# Altium footprint library LGA-12_L2.0-W2.0-P0.50-BL.PcbLib: 1 footprints
Each footprint in its own frame and in the unit in brackets; x right, y up, seen from the top. Pads: shape width x height; smd on the part's side, far side on the other; paste and mask are expansions set on the pad; w line width, h text height; cw(c..) or ccw(c..) is an arc to the next point about the centre after c.
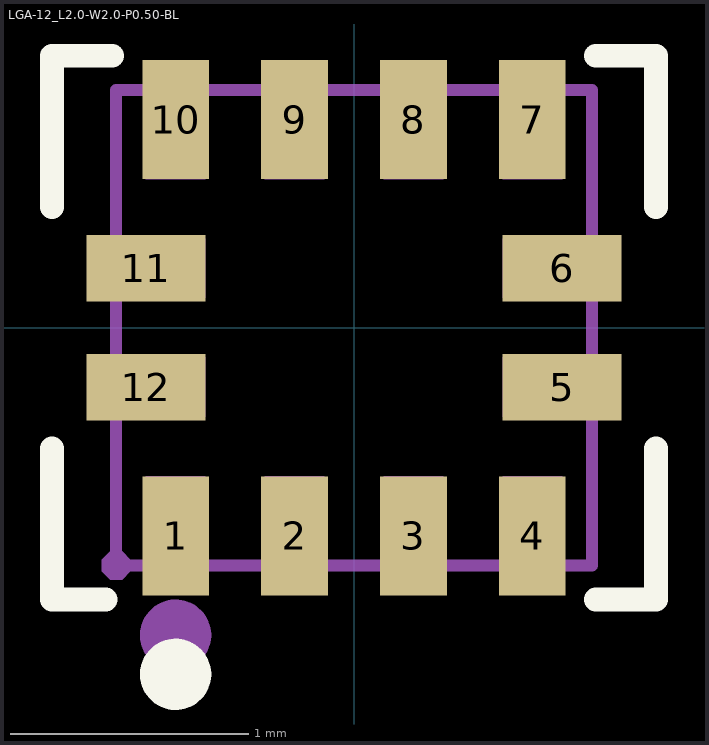
[diagram p0: the footprint, top view; thin cyan lines are the x and y axes]

## LGA-12_L2.0-W2.0-P0.50-BL [mm]
pads (12):
  rect 0.28x0.5 smd paste+0.051: 1(-0.75,-0.875) 2(-0.25,-0.875) 3(0.25,-0.875) 4(0.75,-0.875) 7(0.75,0.875) 8(0.25,0.875) 9(-0.25,0.875) 10(-0.75,0.875)
  rect 0.5x0.28 smd paste+0.051: 5(0.875,-0.25) 6(0.875,0.25) 11(-0.875,0.25) 12(-0.875,-0.25)
Top Overlay:
  circle w0.15: c-0.75,-1.457 r0.075
  lines w0.1: -1.27,-0.508 -1.27,-1.143 -1.044,-1.143 ; -1.27,0.508 -1.27,1.143 -1.016,1.143 ; 1.016,-1.143 1.27,-1.143 1.27,-0.508 ; 1.016,1.143 1.27,1.143 1.27,0.508
Mechanical 2:
  circle w0.15: c-0.75,-1.293 r0.075
Mechanical 6:
  lines w0.051: -1,-1 -1,1 1,1 1,-1 -1,-1
Mechanical 8:
  region: -0.94,-1 -0.94,-1.025 -0.975,-1.06 -1.025,-1.06 -1.06,-1.025 -1.06,-1 -1.06,-0.975 -1.025,-0.94 -0.975,-0.94 -0.94,-0.975 -0.94,-1
Mechanical 9:
  region: -0.875,-0.625 -0.625,-0.625 -0.625,-0.9 -0.875,-0.9
  region: -0.375,-0.625 -0.125,-0.625 -0.125,-0.9 -0.375,-0.9
  region: 0.125,-0.625 0.375,-0.625 0.375,-0.9 0.125,-0.9
  region: 0.625,-0.625 0.875,-0.625 0.875,-0.9 0.625,-0.9
  region: 0.625,-0.375 0.625,-0.125 0.9,-0.125 0.9,-0.375
  region: 0.625,0.125 0.625,0.375 0.9,0.375 0.9,0.125
  region: 0.875,0.625 0.625,0.625 0.625,0.9 0.875,0.9
  region: 0.375,0.625 0.125,0.625 0.125,0.9 0.375,0.9
  region: -0.125,0.625 -0.375,0.625 -0.375,0.9 -0.125,0.9
  region: -0.625,0.625 -0.875,0.625 -0.875,0.9 -0.625,0.9
  region: -0.625,0.375 -0.625,0.125 -0.9,0.125 -0.9,0.375
  region: -0.625,-0.125 -0.625,-0.375 -0.9,-0.375 -0.9,-0.125